# Altium footprint library Connectors.PcbLib: 120 footprints (part 3 of 8)
Each footprint in its own frame and in the unit in brackets; x right, y up, seen from the top. Pads: shape width x height; smd on the part's side, far side on the other; paste and mask are expansions set on the pad; w line width, h text height; cw(c..) or ccw(c..) is an arc to the next point about the centre after c.
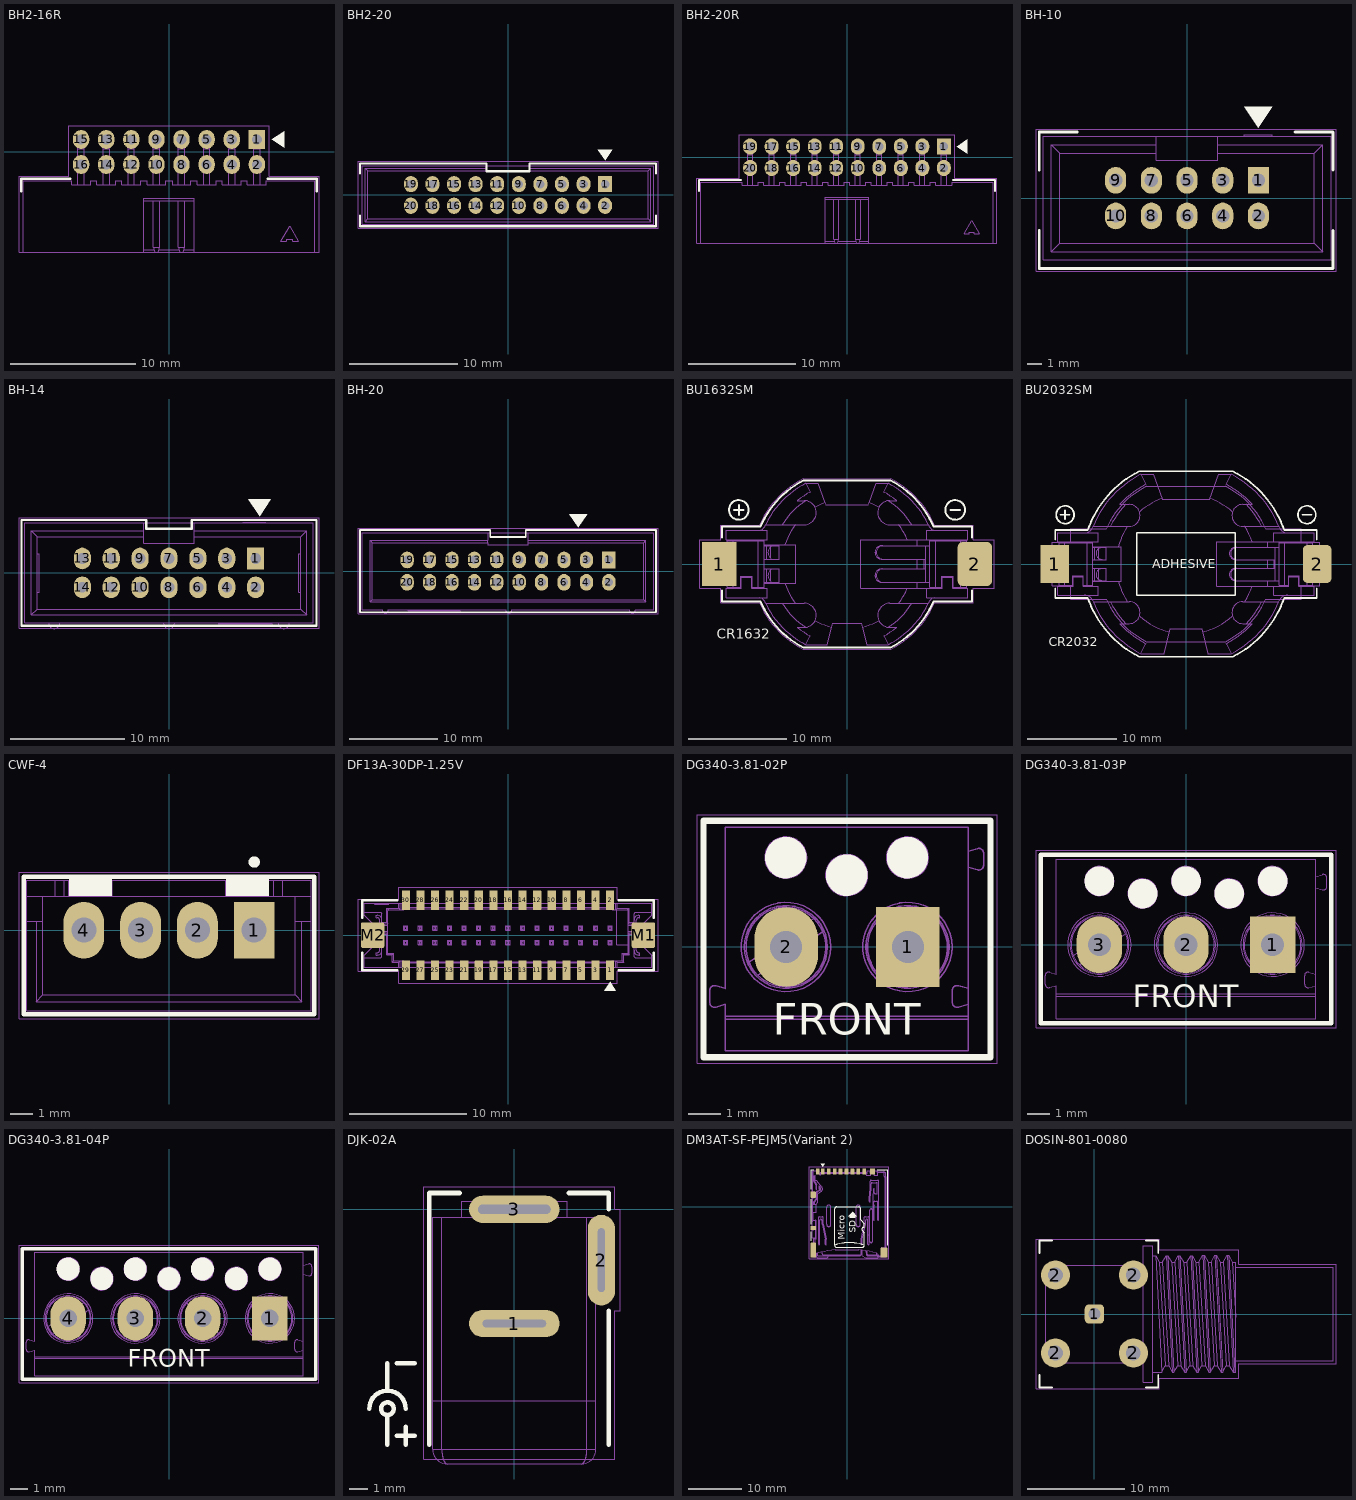
[diagram p2: the footprints below, top view; thin cyan lines are the x and y axes]

## BH2-16R [mm]
pads (16):
  rect 1.3x1.5 hole 0.8: 1(7,1)
  oval 1.3x1.5 hole 0.8: 2(7,-1) 3(5,1) 4(5,-1) 5(3,1) 6(3,-1) 7(1,1) 8(1,-1) 9(-1,1) 10(-1,-1) 11(-3,1) 12(-3,-1) 13(-5,1) 14(-5,-1) 15(-7,1) 16(-7,-1)
Top Overlay:
  region: 8.2,1 9.2,1.667 9.2,0.333
  lines w0.2: -11.775,-3.125 -11.775,-2.125 -7.875,-2.125 ; 7.875,-2.125 11.775,-2.125 11.775,-3.125
Top Courtyard:
  lines w0.025: -11.95,-8 -11.95,-1.95 -8,-1.95 -8,2.1 8,2.1 8,-1.95 11.95,-1.95 11.95,-8 -11.95,-8
Top Assembly:
  lines w0.05: -7.25,-2.6 -7.25,0.25 ; -6.75,-2.6 -6.75,0.25 ; -5.25,-2.6 -5.25,0.25 ; -4.75,-2.6 -4.75,0.25 ; -3.25,-2.6 -3.25,0.25 ; -2.75,-2.6 -2.75,0.25 ; -2,-7.8 -1.196,-7.8 ; -2,-3.9 2,-3.9 ; -1.25,-3.9 -1.25,-7.6 ; -1.25,-2.6 -1.25,0.25 ; -0.804,-7.8 0.804,-7.8 ; -0.75,-3.9 -0.75,-7.6 ; -0.75,-2.6 -0.75,0.25 ; 0.75,-3.9 0.75,-7.6 ; 0.75,-2.6 0.75,0.25 ; 1.196,-7.8 2,-7.8 ; 1.25,-3.9 1.25,-7.6 ; 1.25,-2.6 1.25,0.25 ; 2.75,-2.6 2.75,0.25 ; 3.25,-2.6 3.25,0.25 ; 4.75,-2.6 4.75,0.25 ; 5.25,-2.6 5.25,0.25 ; 6.75,-2.6 6.75,0.25 ; 7.25,-2.6 7.25,0.25 ; -7.25,0.25 -6.75,0.25 ; -7.25,0.25 -7.25,1.25 -6.75,1.25 -6.75,0.25 ; -5.25,0.25 -4.75,0.25 ; -5.25,0.25 -5.25,1.25 -4.75,1.25 -4.75,0.25 ; -3.25,0.25 -2.75,0.25 ; -3.25,0.25 -3.25,1.25 -2.75,1.25 -2.75,0.25 ; -2,-8 -2,-3.7 2,-3.7 2,-8 ; -2,-8 -11.6,-8 -11.6,-2.3 -7.75,-2.3 -7.75,-2.6 -6.25,-2.6 -6.25,-2.3 -5.75,-2.3 -5.75,-2.6 -4.25,-2.6 -4.25,-2.3 -3.75,-2.3 -3.75,-2.6 -2.25,-2.6 -2.25,-2.3 -1.75,-2.3 -1.75,-2.6 -0.25,-2.6 -0.25,-2.3 0.25,-2.3 0.25,-2.6 1.75,-2.6 1.75,-2.3 2.25,-2.3 2.25,-2.6 3.75,-2.6 3.75,-2.3 4.25,-2.3 4.25,-2.6 5.75,-2.6 5.75,-2.3 6.25,-2.3 6.25,-2.6 7.75,-2.6 7.75,-2.3 11.6,-2.3 11.6,-8 2,-8 ; -2,-8 -1.143,-8 ; -1.25,-7.6 -0.75,-7.6 ; -1.25,-7.6 -1.143,-8 ; -1.25,0.25 -0.75,0.25 ; -1.25,0.25 -1.25,1.25 -0.75,1.25 -0.75,0.25 ; -1.143,-8 -0.857,-8 ; -0.857,-8 0.857,-8 ; -0.857,-8 -0.75,-7.6 ; 0.75,-7.6 0.857,-8 ; 0.75,-7.6 1.25,-7.6 ; 0.75,0.25 1.25,0.25 ; 0.75,0.25 0.75,1.25 1.25,1.25 1.25,0.25 ; 0.857,-8 1.143,-8 ; 1.143,-8 2,-8 ; 1.143,-8 1.25,-7.6 ; 2.75,0.25 3.25,0.25 ; 2.75,0.25 2.75,1.25 3.25,1.25 3.25,0.25 ; 4.75,0.25 5.25,0.25 ; 4.75,0.25 4.75,1.25 5.25,1.25 5.25,0.25 ; 6.75,0.25 7.25,0.25 ; 6.75,0.25 6.75,1.25 7.25,1.25 7.25,0.25 ; 8.907,-7.1 9.6,-5.9 10.293,-7.1 9.85,-7.1 9.85,-6.95 9.35,-6.95 9.35,-7.1 8.907,-7.1
  text ".Designator" at -11.011,-5.453 h2
3D body "L-KLS1-202B-16-R-B.x_t": height 5.69, standoff -2.61, extent -11.6,-8 11.6,1.25

## BH2-20 [mm]
pads (20):
  rect 1.3x1.5 hole 0.8: 1(9,1)
  oval 1.3x1.5 hole 0.8: 2(9,-1) 3(7,1) 4(7,-1) 5(5,1) 6(5,-1) 7(3,1) 8(3,-1) 9(1,1) 10(1,-1) 11(-1,1) 12(-1,-1) 13(-3,1) 14(-3,-1) 15(-5,1) 16(-5,-1) 17(-7,1) 18(-7,-1) 19(-9,1) 20(-9,-1)
Top Overlay:
  region: 9,3.2 8.333,4.2 9.667,4.2
  lines w0.2: -13.7,-1.9 -13.7,-2.9 13.7,-2.9 13.7,-1.9 ; -13.7,2 -13.7,2.9 -2,2.9 -2,2.2 2,2.2 2,2.9 13.7,2.9 13.7,2
Top Courtyard:
  lines w0.025: -13.9,-3.1 -13.9,3.1 13.9,3.1 13.9,-3.1 -13.9,-3.1
Top Assembly:
  drawing of 264 lines, arcs and shapes, not listed
  text ".Designator" at -4.511,3.547 h2
3D body "DS1014-20SF1B.x_t": height 5.61, standoff -2.49, extent -13.55,-2.7 13.55,2.7

## BH2-20R [mm]
pads (20):
  rect 1.3x1.5 hole 0.8: 1(9,1)
  oval 1.3x1.5 hole 0.8: 2(9,-1) 3(7,1) 4(7,-1) 5(5,1) 6(5,-1) 7(3,1) 8(3,-1) 9(1,1) 10(1,-1) 11(-1,1) 12(-1,-1) 13(-3,1) 14(-3,-1) 15(-5,1) 16(-5,-1) 17(-7,1) 18(-7,-1) 19(-9,1) 20(-9,-1)
Top Overlay:
  region: 10.2,1 11.2,1.667 11.2,0.333
  lines w0.2: -13.775,-3.125 -13.775,-2.125 -9.875,-2.125 ; 9.875,-2.125 13.775,-2.125 13.775,-3.125
Top Courtyard:
  lines w0.025: -13.95,-8 -13.95,-1.95 -10,-1.95 -10,2.1 10,2.1 10,-1.95 13.95,-1.95 13.95,-8 -13.95,-8
Top Assembly:
  lines w0.05: -9.25,-2.6 -9.25,0.25 ; -8.75,-2.6 -8.75,0.25 ; -7.25,-2.6 -7.25,0.25 ; -6.75,-2.6 -6.75,0.25 ; -5.25,-2.6 -5.25,0.25 ; -4.75,-2.6 -4.75,0.25 ; -3.25,-2.6 -3.25,0.25 ; -2.75,-2.6 -2.75,0.25 ; -2,-7.8 -1.196,-7.8 ; -2,-3.9 2,-3.9 ; -1.25,-3.9 -1.25,-7.6 ; -1.25,-2.6 -1.25,0.25 ; -0.804,-7.8 0.804,-7.8 ; -0.75,-3.9 -0.75,-7.6 ; -0.75,-2.6 -0.75,0.25 ; 0.75,-3.9 0.75,-7.6 ; 0.75,-2.6 0.75,0.25 ; 1.196,-7.8 2,-7.8 ; 1.25,-3.9 1.25,-7.6 ; 1.25,-2.6 1.25,0.25 ; 2.75,-2.6 2.75,0.25 ; 3.25,-2.6 3.25,0.25 ; 4.75,-2.6 4.75,0.25 ; 5.25,-2.6 5.25,0.25 ; 6.75,-2.6 6.75,0.25 ; 7.25,-2.6 7.25,0.25 ; 8.75,-2.6 8.75,0.25 ; 9.25,-2.6 9.25,0.25 ; -9.25,0.25 -9.25,1.25 -8.75,1.25 -8.75,0.25 ; -9.25,0.25 -8.75,0.25 ; -7.25,0.25 -7.25,1.25 -6.75,1.25 -6.75,0.25 ; -7.25,0.25 -6.75,0.25 ; -5.25,0.25 -5.25,1.25 -4.75,1.25 -4.75,0.25 ; -5.25,0.25 -4.75,0.25 ; -3.25,0.25 -3.25,1.25 -2.75,1.25 -2.75,0.25 ; -3.25,0.25 -2.75,0.25 ; -2,-8 -1.143,-8 ; -2,-8 -13.6,-8 -13.6,-2.3 -9.75,-2.3 -9.75,-2.6 -8.25,-2.6 -8.25,-2.3 -7.75,-2.3 -7.75,-2.6 -6.25,-2.6 -6.25,-2.3 -5.75,-2.3 -5.75,-2.6 -4.25,-2.6 -4.25,-2.3 -3.75,-2.3 -3.75,-2.6 -2.25,-2.6 -2.25,-2.3 -1.75,-2.3 -1.75,-2.6 -0.25,-2.6 -0.25,-2.3 0.25,-2.3 0.25,-2.6 1.75,-2.6 1.75,-2.3 2.25,-2.3 2.25,-2.6 3.75,-2.6 3.75,-2.3 4.25,-2.3 4.25,-2.6 5.75,-2.6 5.75,-2.3 6.25,-2.3 6.25,-2.6 7.75,-2.6 7.75,-2.3 8.25,-2.3 8.25,-2.6 9.75,-2.6 9.75,-2.3 13.6,-2.3 13.6,-8 2,-8 ; -2,-8 -2,-3.7 2,-3.7 2,-8 ; -1.25,-7.6 -1.143,-8 ; -1.25,-7.6 -0.75,-7.6 ; -1.25,0.25 -1.25,1.25 -0.75,1.25 -0.75,0.25 ; -1.25,0.25 -0.75,0.25 ; -1.143,-8 -0.857,-8 ; -0.857,-8 -0.75,-7.6 ; -0.857,-8 0.857,-8 ; 0.75,-7.6 0.857,-8 ; 0.75,-7.6 1.25,-7.6 ; 0.75,0.25 0.75,1.25 1.25,1.25 1.25,0.25 ; 0.75,0.25 1.25,0.25 ; 0.857,-8 1.143,-8 ; 1.143,-8 1.25,-7.6 ; 1.143,-8 2,-8 ; 2.75,0.25 2.75,1.25 3.25,1.25 3.25,0.25 ; 2.75,0.25 3.25,0.25 ; 4.75,0.25 4.75,1.25 5.25,1.25 5.25,0.25 ; 4.75,0.25 5.25,0.25 ; 6.75,0.25 6.75,1.25 7.25,1.25 7.25,0.25 ; 6.75,0.25 7.25,0.25 ; 8.75,0.25 8.75,1.25 9.25,1.25 9.25,0.25 ; 8.75,0.25 9.25,0.25 ; 10.907,-7.1 11.35,-7.1 11.35,-6.95 11.85,-6.95 11.85,-7.1 12.293,-7.1 11.6,-5.9 10.907,-7.1
  text ".Designator" at -11.011,-5.453 h2
3D body "DS1014-20RF1B-B.x_t": height 5.69, standoff -2.61, extent -13.6,-8 13.6,1.25

## BH-10 [mm] "DS1013-10S CONNFLY"
pads (10):
  rect 1.5x1.9 hole 0.95: 1(5.08,1.27)
  oval 1.5x1.9 hole 0.95: 2(5.08,-1.27) 3(2.54,1.27) 4(2.54,-1.27) 5(0,1.27) 6(0,-1.27) 7(-2.54,1.27) 8(-2.54,-1.27) 9(-5.08,1.27) 10(-5.08,-1.27)
Top Overlay:
  region: 5.08,5 4.08,6.5 6.08,6.5
  lines w0.2: -10.52,-2.3 -10.52,-5 -0.92,-5 7.68,-5 10.38,-5 10.38,-2.3 ; -10.52,2 -10.52,4.7 -7.82,4.7 ; 7.68,4.7 10.38,4.7 10.38,2
Top Courtyard:
  lines w0.025: -10.75,-5.2 10.6,-5.2 10.6,4.9 -10.75,4.9 -10.75,-5.2
Top Assembly:
  lines w0.05: 4.08,4.4 4.08,4.5 6.08,4.5 6.08,4.4 ; -9.65,-3.8 -9.05,-3.2 ; -9.65,-3.8 9.65,-3.8 ; -9.65,-3.8 -9.65,3.8 ; -9.65,3.8 -9.05,3.2 ; -9.65,3.8 -2.2,3.8 ; -9.05,-3.2 9.05,-3.2 ; -9.05,-3.2 -9.05,3.2 ; -9.05,3.2 -2.2,3.2 ; -5.4,-1.59 -4.76,-1.59 ; -5.4,-1.59 -5.4,-0.95 ; -5.4,-1.59 -5.3,-1.49 ; -5.4,-0.95 -4.76,-0.95 ; -5.4,-0.95 -5.3,-1.05 ; -5.4,0.95 -4.76,0.95 ; -5.4,0.95 -5.4,1.59 ; -5.4,0.95 -5.3,1.05 ; -5.4,1.59 -4.76,1.59 ; -5.4,1.59 -5.3,1.49 ; -5.3,-1.49 -4.86,-1.49 ; -5.3,-1.49 -5.3,-1.05 ; -5.3,-1.05 -4.86,-1.05 ; -5.3,1.05 -4.86,1.05 ; -5.3,1.05 -5.3,1.49 ; -5.3,1.49 -4.86,1.49 ; -4.86,-1.49 -4.86,-1.05 ; -4.86,-1.49 -4.76,-1.59 ; -4.86,-1.05 -4.76,-0.95 ; -4.86,1.05 -4.86,1.49 ; -4.86,1.05 -4.76,0.95 ; -4.86,1.49 -4.76,1.59 ; -4.76,-1.59 -4.76,-0.95 ; -4.76,0.95 -4.76,1.59 ; -2.86,-1.59 -2.86,-0.95 ; -2.86,-1.59 -2.76,-1.49 ; -2.86,-1.59 -2.22,-1.59 ; -2.86,-0.95 -2.22,-0.95 ; -2.86,-0.95 -2.76,-1.05 ; -2.86,0.95 -2.22,0.95 ; -2.86,0.95 -2.86,1.59 ; -2.86,0.95 -2.76,1.05 ; -2.86,1.59 -2.22,1.59 ; -2.86,1.59 -2.76,1.49 ; -2.76,-1.49 -2.76,-1.05 ; -2.76,-1.49 -2.32,-1.49 ; -2.76,-1.05 -2.32,-1.05 ; -2.76,1.05 -2.32,1.05 ; -2.76,1.05 -2.76,1.49 ; -2.76,1.49 -2.32,1.49 ; -2.32,-1.49 -2.32,-1.05 ; -2.32,-1.49 -2.22,-1.59 ; -2.32,-1.05 -2.22,-0.95 ; -2.32,1.05 -2.32,1.49 ; -2.32,1.05 -2.22,0.95 ; -2.32,1.49 -2.22,1.59 ; -2.22,-1.59 -2.22,-0.95 ; -2.22,0.95 -2.22,1.59 ; -2.2,3.2 -2.2,2.7 2.2,2.7 2.2,3.2 ; -2.2,3.2 -2.2,3.8 ; -2.2,3.8 -2.2,4.4 ; -2.2,4.4 2.2,4.4 ; -2.2,4.4 -10.25,4.4 -10.25,-4.4 10.25,-4.4 10.25,4.4 2.2,4.4 ; -0.32,-1.59 0.32,-1.59 ; -0.32,-1.59 -0.32,-0.95 ; -0.32,-1.59 -0.22,-1.49 ; -0.32,-0.95 0.32,-0.95 ; -0.32,-0.95 -0.22,-1.05 ; -0.32,0.95 -0.32,1.59 ; -0.32,0.95 -0.22,1.05 ; -0.32,0.95 0.32,0.95 ; -0.32,1.59 0.32,1.59 ; -0.32,1.59 -0.22,1.49 ; -0.22,-1.49 0.22,-1.49 ; -0.22,-1.49 -0.22,-1.05 ; -0.22,-1.05 0.22,-1.05 ; -0.22,1.05 -0.22,1.49 ; -0.22,1.05 0.22,1.05 ; -0.22,1.49 0.22,1.49 ; 0.22,-1.49 0.22,-1.05 ; 0.22,-1.49 0.32,-1.59 ; 0.22,-1.05 0.32,-0.95 ; 0.22,1.05 0.22,1.49 ; 0.22,1.05 0.32,0.95 ; 0.22,1.49 0.32,1.59 ; 0.32,-1.59 0.32,-0.95 ; 0.32,0.95 0.32,1.59 ; 2.2,3.2 2.2,3.8 ; 2.2,3.2 9.05,3.2 ; 2.2,3.8 2.2,4.4 ; 2.2,3.8 9.65,3.8 ; 2.22,-1.59 2.22,-0.95 ; 2.22,-1.59 2.32,-1.49 ; 2.22,-1.59 2.86,-1.59 ; 2.22,-0.95 2.86,-0.95 ; 2.22,-0.95 2.32,-1.05 ; 2.22,0.95 2.86,0.95 ; 2.22,0.95 2.22,1.59 ; 2.22,0.95 2.32,1.05 ; 2.22,1.59 2.86,1.59 ; 2.22,1.59 2.32,1.49 ; 2.32,-1.49 2.32,-1.05 ; 2.32,-1.49 2.76,-1.49 ; 2.32,-1.05 2.76,-1.05 ; 2.32,1.05 2.76,1.05 ; 2.32,1.05 2.32,1.49 ; 2.32,1.49 2.76,1.49 ; 2.76,-1.49 2.76,-1.05 ; 2.76,-1.49 2.86,-1.59 ; 2.76,-1.05 2.86,-0.95 ; 2.76,1.05 2.76,1.49 ; 2.76,1.05 2.86,0.95 ; 2.76,1.49 2.86,1.59 ; 2.86,-1.59 2.86,-0.95 ; 2.86,0.95 2.86,1.59 ; 4.76,-1.59 4.76,-0.95 ; 4.76,-1.59 4.86,-1.49 ; 4.76,-1.59 5.4,-1.59 ; 4.76,-0.95 5.4,-0.95 ; 4.76,-0.95 4.86,-1.05 ; 4.76,0.95 4.76,1.59 ; 4.76,0.95 4.86,1.05 ; 4.76,0.95 5.4,0.95 ; 4.76,1.59 5.4,1.59 ; 4.76,1.59 4.86,1.49 ; 4.86,-1.49 4.86,-1.05 ; 4.86,-1.49 5.3,-1.49 ; 4.86,-1.05 5.3,-1.05 ; 4.86,1.05 4.86,1.49 ; 4.86,1.05 5.3,1.05 ; 4.86,1.49 5.3,1.49 ; 5.3,-1.49 5.3,-1.05 ; 5.3,-1.49 5.4,-1.59 ; 5.3,-1.05 5.4,-0.95 ; 5.3,1.05 5.3,1.49 ; 5.3,1.05 5.4,0.95 ; 5.3,1.49 5.4,1.59 ; 5.4,-1.59 5.4,-0.95 ; 5.4,0.95 5.4,1.59 ; 9.05,-3.2 9.05,3.2 ; 9.05,-3.2 9.65,-3.8 ; 9.05,3.2 9.65,3.8 ; 9.65,-3.8 9.65,3.8
  text ".Designator" at -4.511,5.047 h2
3D body "User Library-IDC-10M.STEP": height 9.3, standoff -3.1, extent -10.17,-4.7 10.13,4.4

## BH-14 [mm]
pads (14):
  rect 1.5x1.9 hole 0.95: 1(7.62,1.27)
  oval 1.5x1.9 hole 0.95: 2(7.62,-1.27) 3(5.08,1.27) 4(5.08,-1.27) 5(2.54,1.27) 6(2.54,-1.27) 7(0,1.27) 8(0,-1.27) 9(-2.54,1.27) 10(-2.54,-1.27) 11(-5.08,1.27) 12(-5.08,-1.27) 13(-7.62,1.27) 14(-7.62,-1.27)
Top Overlay:
  region: 7.961,4.965 6.961,6.465 8.961,6.465
  lines w0.2: -12.965,-4.65 -12.965,4.65 -2,4.65 -2,3.875 2,3.875 2,4.65 12.965,4.65 12.965,-4.65 -2,-4.65 -12.95,-4.65
Top Courtyard:
  lines w0.025: -13.19,-4.85 13.19,-4.85 13.19,4.85 -13.19,4.85 -13.19,-4.85
Top Assembly:
  drawing of 204 lines, arcs and shapes, not listed
  text ".Designator" at -4.511,5.047 h2
3D body "IDC-14_X_T.x_t": height 9.45, standoff -3.25, extent -12.7,-4.946 12.7,4.4

## BH-20 [mm]
pads (20):
  rect 1.5x1.9 hole 0.95: 1(11.43,1.27)
  oval 1.5x1.9 hole 0.95: 2(11.43,-1.27) 3(8.89,1.27) 4(8.89,-1.27) 5(6.35,1.27) 6(6.35,-1.27) 7(3.81,1.27) 8(3.81,-1.27) 9(1.27,1.27) 10(1.27,-1.27) 11(-1.27,1.27) 12(-1.27,-1.27) 13(-3.81,1.27) 14(-3.81,-1.27) 15(-6.35,1.27) 16(-6.35,-1.27) 17(-8.89,1.27) 18(-8.89,-1.27) 19(-11.43,1.27) 20(-11.43,-1.27)
Top Overlay:
  region: 7.961,4.965 6.961,6.465 8.961,6.465
  lines w0.2: -16.775,-4.65 -16.775,-1.95 -16.775,4.65 -2,4.65 -2,3.875 2,3.875 2,4.65 16.775,4.65 16.775,1.95 16.775,-4.65 -2,-4.65 -16.775,-4.65
Top Courtyard:
  lines w0.025: -17,-4.85 -17,4.85 17,4.85 17,-4.85 -17,-4.85
Top Assembly:
  drawing of 276 lines, arcs and shapes, not listed
  text ".Designator" at -4.511,5.047 h2
3D body "BH-20.step": height 9.05, standoff -2.8, extent -16.51,-4.725 16.51,4.375

## BU1632SM [mm] "CR1632 Holder"
pads (2):
  rect 3.5x4.5 smd paste-3 mask+0.08: 1(-13,0)
  rrect30% 3.5x4.5 smd paste-3 mask+0.08: 2(13,0)
Top Overlay:
  circle w0.2: c11,5.5 r1
  circle w0.2: c-11,5.5 r1
  lines w0.2: -12.7,-2.7 -12.7,-3.8 -8.8,-3.8 ccw(c0,0) -4.406,-8.513 4.406,-8.513 ccw(c0,0) 8.8,-3.8 12.7,-3.8 12.7,-2.7 ; -12.7,2.7 -12.7,3.8 -8.8,3.8 cw(c0,0) -4.406,8.513 4.406,8.513 cw(c0,0) 8.8,3.8 12.7,3.8 12.7,2.7 ; -11.5,5.5 -10.5,5.5 ; -11,5 -11,6 ; 10.5,5.5 11.5,5.5
  text "CR1632" at -13.249,-7.6 h1
Top Paste:
  rectangle: 13.7,-2.05 14.5,-1.25
  rectangle: 12.6,-2.05 13.4,-1.25
  rectangle: 11.5,-2.05 12.3,-1.25
  rectangle: 13.7,-0.95 14.5,-0.15
  rectangle: 12.6,-0.95 13.4,-0.15
  rectangle: 11.5,-0.95 12.3,-0.15
  rectangle: 13.7,0.15 14.5,0.95
  rectangle: 12.6,0.15 13.4,0.95
  rectangle: 11.5,0.15 12.3,0.95
  rectangle: 13.7,1.25 14.5,2.05
  rectangle: 12.6,1.25 13.4,2.05
  rectangle: 11.5,1.25 12.3,2.05
  rectangle: -12.3,-2.05 -11.5,-1.25
  rectangle: -13.4,-2.05 -12.6,-1.25
  rectangle: -14.5,-2.05 -13.7,-1.25
  rectangle: -12.3,-0.95 -11.5,-0.15
  rectangle: -13.4,-0.95 -12.6,-0.15
  rectangle: -14.5,-0.95 -13.7,-0.15
  rectangle: -12.3,0.15 -11.5,0.95
  rectangle: -13.4,0.15 -12.6,0.95
  rectangle: -14.5,0.15 -13.7,0.95
  rectangle: -12.3,1.25 -11.5,2.05
  rectangle: -13.4,1.25 -12.6,2.05
  rectangle: -14.5,1.25 -13.7,2.05
Top Courtyard:
  lines w0.025: -14.95,-2.45 -12.85,-2.45 -12.85,-3.95 -8.9,-3.95 ccw(c0,0) -4.452,-8.66 4.452,-8.66 ccw(c0,0) 8.9,-3.95 12.85,-3.95 12.85,-2.45 14.95,-2.45 14.95,2.45 12.85,2.45 12.85,3.95 8.9,3.95 ccw(c0,0) 4.452,8.66 -4.452,8.66 ccw(c0,0) -8.9,3.95 -12.85,3.95 -12.85,2.45 -14.95,2.45 -14.95,-2.45
Top Assembly:
  drawing of 210 lines, arcs and shapes, not listed
  text ".Designator" at -8.763,-0.679 h3
3D body "BU1632SM-JJ-GTR.STEP": height 5.47, standoff 0.17, extent -13.85,-8.2 13.85,8.2

## BU2032SM [mm] "CR0232 Holder"
pads (2):
  rect 3.2x4.2 smd paste-3 mask+0.08: 1(-14.65,0)
  rrect30% 3.2x4.2 smd paste-3 mask+0.08: 2(14.65,0)
Top Overlay:
  circle w0.2: c13.5,5.5 r1
  circle w0.2: c-13.5,5.5 r1
  lines w0.2: -14.6,-2.7 -14.6,-3.8 -10.964,-3.8 ; -14.6,2.7 -14.6,3.8 -10.964,3.8 ; -14,5.5 -13,5.5 ; -13.5,5 -13.5,6 ; -10.96,-3.799 ccw(c0,0) -5.224,-10.357 5.224,-10.357 ccw(c0,0) 10.96,-3.799 ; -10.96,3.799 cw(c0,0) -5.224,10.357 5.224,10.357 cw(c0,0) 10.96,3.799 ; 10.964,-3.8 14.6,-3.8 14.6,-2.7 ; 10.964,3.8 14.6,3.8 14.6,2.7 ; 13,5.5 14,5.5 ; -5.5,-3.5 -5.5,3.5 5.5,3.5 5.5,-3.5 -5.5,-3.5
  text "ADHESIVE" at -3.749,-0.5 h1
  text "CR2032" at -15.332,-9.2 h1
Top Paste:
  region: 13.95,-1.25 13.15,-1.25 13.15,-2.05 13.95,-2.05
  region: 15.05,-1.25 14.25,-1.25 14.25,-2.05 15.05,-2.05
  region: 16.15,-1.25 15.35,-1.25 15.35,-2.05 16.15,-2.05
  region: 13.95,-0.15 13.15,-0.15 13.15,-0.95 13.95,-0.95
  region: 15.05,-0.15 14.25,-0.15 14.25,-0.95 15.05,-0.95
  region: 16.15,-0.15 15.35,-0.15 15.35,-0.95 16.15,-0.95
  region: 13.95,0.95 13.15,0.95 13.15,0.15 13.95,0.15
  region: 15.05,0.95 14.25,0.95 14.25,0.15 15.05,0.15
  region: 16.15,0.95 15.35,0.95 15.35,0.15 16.15,0.15
  region: 13.95,2.05 13.15,2.05 13.15,1.25 13.95,1.25
  region: 15.05,2.05 14.25,2.05 14.25,1.25 15.05,1.25
  region: 16.15,2.05 15.35,2.05 15.35,1.25 16.15,1.25
  rectangle: -13.95,-2.05 -13.15,-1.25
  rectangle: -15.05,-2.05 -14.25,-1.25
  rectangle: -16.15,-2.05 -15.35,-1.25
  rectangle: -13.95,-0.95 -13.15,-0.15
  rectangle: -15.05,-0.95 -14.25,-0.15
  rectangle: -16.15,-0.95 -15.35,-0.15
  rectangle: -13.95,0.15 -13.15,0.95
  rectangle: -15.05,0.15 -14.25,0.95
  rectangle: -16.15,0.15 -15.35,0.95
  rectangle: -13.95,1.25 -13.15,2.05
  rectangle: -15.05,1.25 -14.25,2.05
  rectangle: -16.15,1.25 -15.35,2.05
Top Courtyard:
  lines w0.025: -14.95,-2.45 -12.85,-2.45 -12.85,-3.95 -8.9,-3.95 ccw(c0,0) -4.452,-8.66 4.452,-8.66 ccw(c0,0) 8.9,-3.95 12.85,-3.95 12.85,-2.45 14.95,-2.45 14.95,2.45 12.85,2.45 12.85,3.95 8.9,3.95 ccw(c0,0) 4.452,8.66 -4.452,8.66 ccw(c0,0) -8.9,3.95 -12.85,3.95 -12.85,2.45 -14.95,2.45 -14.95,-2.45
Top Assembly:
  drawing of 213 lines, arcs and shapes, not listed
  text ".Designator" at -8.763,-0.679 h3
3D body "BU2032SM-JJ-GTR.x_t": height 5.47, standoff 0.17, extent -15.85,-10 15.85,10

## CWF-4 [mm]
height 0.6
pads (4):
  rect 1.8x2.5 hole 1.1: 1(3.75,0)
  oval 1.8x2.5 hole 1.1: 2(1.25,0) 3(-1.25,0) 4(-3.75,0)
Top Overlay:
  circle w0.25: c3.75,3 r0.125
  rectangle: -4.4,1.5 -2.5,2.35
  region: 4.4,2.35 2.5,2.35 2.5,1.5 4.4,1.5
  lines w0.2: -6.4,-3.7 -6.4,2.35 6.4,2.35 6.4,-3.7 -6.4,-3.7
Top Courtyard:
  lines w0.025: -6.6,-3.9 6.6,-3.9 6.6,2.55 -6.6,2.55 -6.6,-3.9
Top Assembly:
  lines w0.05: -5.55,1.5 -5.55,0.4 ; 5.55,1.5 5.55,0.4 ; -6.25,0.4 -5.85,0.4 ; -6.25,0.4 -6.25,1.5 ; -6.25,0.4 -6.25,-3.55 6.25,-3.55 6.25,0.4 ; -6.25,1.5 -6.25,2.2 -5,2.2 ; -6.25,1.5 -5,1.5 ; -5.85,-3.15 5.85,-3.15 ; -5.85,-3.15 -5.85,0.4 ; -5.85,-3.15 -5.55,-2.85 ; -5.85,0.4 -5.55,0.4 ; -5.55,-2.85 5.55,-2.85 ; -5.55,-2.85 -5.55,0.4 ; -5,1.5 -4.6,1.5 ; -5,1.5 -5,2.2 ; -5,2.2 -4.6,2.2 ; -4.6,1.5 -4.4,1.5 ; -4.6,1.5 -4.6,2.2 ; -4.6,2.2 -4.4,2.2 ; -4.4,1.5 -4.4,2.2 ; -4.4,1.5 -2.5,1.5 ; -4.4,2.2 -2.5,2.2 ; -4.07,-0.32 -3.97,-0.22 ; -4.07,-0.32 -4.07,0.32 ; -4.07,-0.32 -3.43,-0.32 ; -4.07,0.32 -3.97,0.22 ; -4.07,0.32 -3.43,0.32 ; -3.97,-0.22 -3.97,0.22 ; -3.97,-0.22 -3.53,-0.22 ; -3.97,0.22 -3.53,0.22 ; -3.53,-0.22 -3.43,-0.32 ; -3.53,-0.22 -3.53,0.22 ; -3.53,0.22 -3.43,0.32 ; -3.43,-0.32 -3.43,0.32 ; -2.5,1.5 2.5,1.5 ; -2.5,1.5 -2.5,2.2 ; -2.5,2.2 2.5,2.2 ; -1.57,-0.32 -0.93,-0.32 ; -1.57,-0.32 -1.47,-0.22 ; -1.57,-0.32 -1.57,0.32 ; -1.57,0.32 -1.47,0.22 ; -1.57,0.32 -0.93,0.32 ; -1.47,-0.22 -1.03,-0.22 ; -1.47,-0.22 -1.47,0.22 ; -1.47,0.22 -1.03,0.22 ; -1.03,-0.22 -0.93,-0.32 ; -1.03,-0.22 -1.03,0.22 ; -1.03,0.22 -0.93,0.32 ; -0.93,-0.32 -0.93,0.32 ; 0.93,-0.32 1.57,-0.32 ; 0.93,-0.32 1.03,-0.22 ; 0.93,-0.32 0.93,0.32 ; 0.93,0.32 1.03,0.22 ; 0.93,0.32 1.57,0.32 ; 1.03,-0.22 1.47,-0.22 ; 1.03,-0.22 1.03,0.22 ; 1.03,0.22 1.47,0.22 ; 1.47,-0.22 1.57,-0.32 ; 1.47,-0.22 1.47,0.22 ; 1.47,0.22 1.57,0.32 ; 1.57,-0.32 1.57,0.32 ; 2.5,1.5 2.5,2.2 ; 2.5,1.5 4.4,1.5 ; 2.5,2.2 4.4,2.2 ; 3.43,-0.32 3.53,-0.22 ; 3.43,-0.32 3.43,0.32 ; 3.43,-0.32 4.07,-0.32 ; 3.43,0.32 3.53,0.22 ; 3.43,0.32 4.07,0.32 ; 3.53,-0.22 3.53,0.22 ; 3.53,-0.22 3.97,-0.22 ; 3.53,0.22 3.97,0.22 ; 3.97,-0.22 4.07,-0.32 ; 3.97,-0.22 3.97,0.22 ; 3.97,0.22 4.07,0.32 ; 4.07,-0.32 4.07,0.32 ; 4.4,1.5 4.6,1.5 ; 4.4,1.5 4.4,2.2 ; 4.4,2.2 4.6,2.2 ; 4.6,1.5 5,1.5 ; 4.6,1.5 4.6,2.2 ; 4.6,2.2 5,2.2 ; 5,1.5 5,2.2 ; 5,1.5 6.25,1.5 ; 5,2.2 6.25,2.2 6.25,1.5 ; 5.55,-2.85 5.55,0.4 ; 5.55,-2.85 5.85,-3.15 ; 5.55,0.4 5.85,0.4 ; 5.85,-3.15 5.85,0.4 ; 5.85,0.4 6.25,0.4 ; 6.25,0.4 6.25,1.5
  text ".Designator" at -4.511,-2.453 h2
3D body "CWF-4.x_t": height 7, standoff -3.5, extent -6.25,-3.55 6.25,2.2

## DF13A-30DP-1.25V [mm] "Double Row Straight Pin Header (SMT)"
height 0.6
pads (32):
  rrect15% 0.7x1.7 smd mask+0.05: 1(8.75,-3) 2(8.75,3) 3(7.5,-3) 4(7.5,3) 5(6.25,-3) 6(6.25,3) 7(5,-3) 8(5,3) 9(3.75,-3) 10(3.75,3) 11(2.5,-3) 12(2.5,3) 13(1.25,-3) 14(1.25,3) 15(0,-3) 16(0,3) 17(-1.25,-3) 18(-1.25,3) 19(-2.5,-3) 20(-2.5,3) 21(-3.75,-3) 22(-3.75,3) 23(-5,-3) 24(-5,3) 25(-6.25,-3) 26(-6.25,3) 27(-7.5,-3) 28(-7.5,3) 29(-8.75,-3) 30(-8.75,3)
  rrect15% 2x2.2 smd mask+0.05: M1(11.6,0) M2(-11.6,0)
Top Overlay:
  region: 8.75,-4 9.25,-4.75 8.25,-4.75
  lines w0.2: -12.5,-1.5 -12.5,-3 -9.5,-3 ; -12.5,1.5 -12.5,3 -9.5,3 ; 9.5,-3 12.5,-3 12.5,-1.5 ; 9.5,3 12.5,3 12.5,1.5
Top Courtyard:
  lines w0.025: -12.85,-3.1 -9.35,-3.1 -9.35,-4.1 9.35,-4.1 9.35,-3.1 12.85,-3.1 12.85,3.1 9.35,3.1 9.35,4.1 -9.35,4.1 -9.35,3.1 -12.85,3.1 -12.85,-3.1
Top Assembly:
  drawing of 984 lines, arcs and shapes, not listed
  text ".Designator" at -4.511,4.547 h2
3D body "DF13EA-30DP-1.25V.STEP": height 4.8, standoff 0, extent -12.3,-3.45 12.3,3.45

## DG340-3.81-02P [mm] "2-way screw terminal, pitch 150mils (3.81mm)"
height 8.4
pads (2):
  rect 2x2.5 hole 1: 1(1.905,0)
  oval 2x2.5 hole 1: 2(-1.905,0)
Top Overlay:
  circle w0.7: c-0.01,2.25 r0.3
  circle w0.7: c1.895,2.8 r0.3
  circle w0.7: c-1.915,2.8 r0.3
  lines w0.2: -4.495,-3.45 4.495,-3.45 4.495,3.95 -4.495,3.95 -4.495,-3.45
  text "FRONT" at -2.333,-2.75 h1
Top Courtyard:
  lines w0.025: -4.7,-3.65 4.7,-3.65 4.7,4.15 -4.7,4.15 -4.7,-3.65
Top Assembly:
  circle w0.05: c-1.915,0 r1.4
  circle w0.05: c1.895,0 r1.4
  circle w0.05: c-1.915,0 r1.3
  circle w0.05: c-1.915,2.8 r0.65
  circle w0.05: c1.895,2.8 r0.65
  circle w0.05: c-0.01,2.25 r0.65
  circle w0.05: c1.895,0 r1.3
  lines w0.05: -3.82,-2.263 3.8,-2.263 ; -3.82,-2.167 3.8,-2.167 ; -2.347,2.342 -1.483,2.342 ; 1.463,2.342 2.327,2.342 ; 3.8,-1.8 3.489,-1.885 cw(c3.45,-1.74) 3.3,-1.74 3.3,-1.36 cw(c3.45,-1.36) 3.489,-1.215 3.8,-1.3 ; 3.8,2.5 4.088,2.416 ccw(c4.13,2.56) 4.28,2.56 4.28,2.94 ccw(c4.13,2.94) 4.088,3.084 3.8,3 ; -3.07,-0.478 cw(c-1.915,0) -1.039,0.892 ; -3.07,-0.478 ccw(c-1.915,0) -2.791,-0.892 ; -3.07,-0.478 -2.815,-0.305 ; -2.815,-0.305 cw(c-1.915,0) -1.295,0.72 ; -2.815,-0.305 -1.295,0.72 ; -2.791,-0.892 ccw(c-1.915,0) -0.76,0.478 ; -2.791,-0.892 -2.535,-0.72 ; -2.535,-0.72 ccw(c-1.915,0) -1.015,0.305 ; -2.535,-0.72 -1.015,0.305 ; -1.295,0.72 -1.039,0.892 ; -1.039,0.892 cw(c-1.915,0) -0.76,0.478 ; -1.015,0.305 -0.76,0.478 ; 1.416,-1.155 cw(c1.895,0) 1.883,1.25 ; 1.416,-1.155 ccw(c1.895,0) 1.907,-1.25 ; 1.416,-1.155 1.475,-0.852 ; 1.475,-0.852 cw(c1.895,0) 1.824,0.947 ; 1.475,-0.852 1.824,0.947 ; 1.824,0.947 1.883,1.25 ; 1.883,1.25 cw(c1.895,0) 2.374,1.155 ; 1.907,-1.25 ccw(c1.895,0) 2.374,1.155 ; 1.907,-1.25 1.966,-0.947 ; 1.966,-0.947 ccw(c1.895,0) 2.315,0.852 ; 1.966,-0.947 2.315,0.852 ; 2.315,0.852 2.374,1.155 ; -4.3,-1.74 ccw(c-4.15,-1.74) -4.108,-1.884 -3.82,-1.8 -3.82,-3.25 3.8,-3.25 3.8,3.75 -3.82,3.75 -3.82,-1.3 -4.108,-1.216 ccw(c-4.15,-1.36) -4.3,-1.36 -4.3,-1.74 ; -2.493,3.05 ccw(c-1.915,2.8) -1.337,3.05 -1.359,3.05 ccw(c-1.915,2.8) -2.471,3.05 -2.493,3.05 ; -0.465,1.814 cw(c-0.01,2.25) -0.465,2.686 -0.465,2.665 -0.465,2.656 cw(c-0.01,2.25) 0.445,2.656 0.445,2.676 0.445,2.686 cw(c-0.01,2.25) 0.445,1.814 0.445,1.835 0.445,1.844 cw(c-0.01,2.25) -0.465,1.844 -0.465,1.824 -0.465,1.814 ; 1.317,3.05 ccw(c1.895,2.8) 2.473,3.05 2.451,3.05 ccw(c1.895,2.8) 1.339,3.05 1.317,3.05
  text ".Designator" at -4.511,4.297 h2
3D body "User Library-DG340-3_81-02P-1Y-00A (H).x_t": height 8.4, standoff -3.6, extent -4.29,-3.25 4.29,3.75

## DG340-3.81-03P [mm] "3-way screw terminal, pitch 150mils (3.81mm)"
height 8.4
pads (3):
  rect 2x2.5 hole 1: 1(3.81,0)
  oval 2x2.5 hole 1: 2(0,0) 3(-3.81,0)
Top Overlay:
  circle w0.7: c-3.81,2.8 r0.3
  circle w0.7: c-1.905,2.25 r0.3
  circle w0.7: c0,2.8 r0.3
  circle w0.7: c1.905,2.25 r0.3
  circle w0.7: c3.81,2.8 r0.3
  lines w0.2: -6.4,-3.45 6.4,-3.45 6.4,3.95 -6.4,3.95 -6.4,-3.45
  text "FRONT" at -2.333,-2.75 h1
Top Courtyard:
  lines w0.025: -6.6,-3.65 6.6,-3.65 6.6,4.15 -6.6,4.15 -6.6,-3.65
Top Assembly:
  circle w0.05: c-3.81,0 r1.4
  circle w0.05: c-3.81,2.8 r0.65
  circle w0.05: c0,0 r1.4
  circle w0.05: c0,2.8 r0.65
  circle w0.05: c3.81,0 r1.4
  circle w0.05: c3.81,2.8 r0.65
  circle w0.05: c-1.905,2.25 r0.65
  circle w0.05: c1.905,2.25 r0.65
  circle w0.05: c3.81,0 r1.3
  circle w0.05: c-3.81,0 r1.3
  circle w0.05: c0,0 r1.3
  lines w0.05: -5.715,-2.263 5.715,-2.263 ; -5.715,-2.167 5.715,-2.167 ; -4.242,2.342 -3.378,2.342 ; -0.432,2.342 0.432,2.342 ; 3.378,2.342 4.242,2.342 ; 5.715,-1.8 5.404,-1.885 cw(c5.365,-1.74) 5.215,-1.74 5.215,-1.36 cw(c5.365,-1.36) 5.404,-1.215 5.715,-1.3 ; 5.715,2.5 6.003,2.416 ccw(c6.045,2.56) 6.195,2.56 6.195,2.94 ccw(c6.045,2.94) 6.003,3.084 5.715,3 ; -4.965,-0.478 cw(c-3.81,0) -2.934,0.892 ; -4.965,-0.478 ccw(c-3.81,0) -4.686,-0.892 ; -4.965,-0.478 -4.71,-0.305 ; -4.71,-0.305 cw(c-3.81,0) -3.19,0.72 ; -4.71,-0.305 -3.19,0.72 ; -4.686,-0.892 ccw(c-3.81,0) -2.655,0.478 ; -4.686,-0.892 -4.43,-0.72 ; -4.43,-0.72 ccw(c-3.81,0) -2.91,0.305 ; -4.43,-0.72 -2.91,0.305 ; -3.19,0.72 -2.934,0.892 ; -2.934,0.892 cw(c-3.81,0) -2.655,0.478 ; -2.91,0.305 -2.655,0.478 ; -0.479,-1.155 cw(c0,0) -0.012,1.25 ; -0.479,-1.155 ccw(c0,0) 0.012,-1.25 ; -0.479,-1.155 -0.42,-0.852 ; -0.42,-0.852 cw(c0,0) -0.071,0.947 ; -0.42,-0.852 -0.071,0.947 ; -0.071,0.947 -0.012,1.25 ; -0.012,1.25 cw(c0,0) 0.479,1.155 ; 0.012,-1.25 ccw(c0,0) 0.479,1.155 ; 0.012,-1.25 0.071,-0.947 ; 0.071,-0.947 ccw(c0,0) 0.42,0.852 ; 0.071,-0.947 0.42,0.852 ; 0.42,0.852 0.479,1.155 ; 2.918,0.876 ccw(c3.81,0) 4.288,-1.155 ; 2.918,0.876 cw(c3.81,0) 3.332,1.155 ; 2.918,0.876 3.09,0.62 ; 3.09,0.62 ccw(c3.81,0) 4.115,-0.9 ; 3.09,0.62 4.115,-0.9 ; 3.332,1.155 cw(c3.81,0) 4.702,-0.876 ; 3.332,1.155 3.505,0.9 ; 3.505,0.9 cw(c3.81,0) 4.53,-0.62 ; 3.505,0.9 4.53,-0.62 ; 4.115,-0.9 4.288,-1.155 ; 4.288,-1.155 ccw(c3.81,0) 4.702,-0.876 ; 4.53,-0.62 4.702,-0.876 ; -6.195,-1.74 ccw(c-6.045,-1.74) -6.003,-1.884 -5.715,-1.8 -5.715,-3.25 5.715,-3.25 5.715,3.75 -5.715,3.75 -5.715,-1.3 -6.003,-1.216 ccw(c-6.045,-1.36) -6.195,-1.36 -6.195,-1.74 ; -4.388,3.05 ccw(c-3.81,2.8) -3.232,3.05 -3.254,3.05 ccw(c-3.81,2.8) -4.366,3.05 -4.388,3.05 ; -2.36,1.814 cw(c-1.905,2.25) -2.36,2.686 -2.36,2.665 -2.36,2.656 cw(c-1.905,2.25) -1.45,2.656 -1.45,2.676 -1.45,2.686 cw(c-1.905,2.25) -1.45,1.814 -1.45,1.835 -1.45,1.844 cw(c-1.905,2.25) -2.36,1.844 -2.36,1.824 -2.36,1.814 ; -0.578,3.05 ccw(c0,2.8) 0.578,3.05 0.556,3.05 ccw(c0,2.8) -0.556,3.05 -0.578,3.05 ; 1.45,1.814 cw(c1.905,2.25) 1.45,2.686 1.45,2.665 1.45,2.656 cw(c1.905,2.25) 2.36,2.656 2.36,2.676 2.36,2.686 cw(c1.905,2.25) 2.36,1.814 2.36,1.835 2.36,1.844 cw(c1.905,2.25) 1.45,1.844 1.45,1.824 1.45,1.814 ; 3.232,3.05 ccw(c3.81,2.8) 4.388,3.05 4.366,3.05 ccw(c3.81,2.8) 3.254,3.05 3.232,3.05
  text ".Designator" at -4.511,4.297 h2
3D body "DG340-3_81-03P-1Y-00A (H).x_t": height 8.4, standoff -3.6, extent -6.195,-3.25 6.195,3.75

## DG340-3.81-04P [mm] "4-way screw terminal, pitch 150mils (3.81mm)"
height 8.4
pads (4):
  rect 2x2.5 hole 1: 1(5.715,0)
  oval 2x2.5 hole 1: 2(1.905,0) 3(-1.905,0) 4(-5.715,0)
Top Overlay:
  circle w0.7: c5.715,2.8 r0.3
  circle w0.7: c3.81,2.25 r0.3
  circle w0.7: c-5.715,2.8 r0.3
  circle w0.7: c-3.81,2.25 r0.3
  circle w0.7: c-1.915,2.8 r0.3
  circle w0.7: c1.895,2.8 r0.3
  circle w0.7: c-0.01,2.25 r0.3
  lines w0.2: -8.305,-3.45 -8.305,3.95 8.305,3.95 8.305,-3.45 -8.305,-3.45
  text "FRONT" at -2.333,-2.75 h1
Top Courtyard:
  lines w0.025: -8.5,-3.65 8.5,-3.65 8.5,4.15 -8.5,4.15 -8.5,-3.65
Top Assembly:
  circle w0.05: c5.715,0 r1.4
  circle w0.05: c5.715,0 r1.3
  circle w0.05: c-5.715,0 r1.4
  circle w0.05: c-1.905,0 r1.4
  circle w0.05: c1.905,0 r1.4
  circle w0.05: c1.905,0 r1.3
  circle w0.05: c-5.715,0 r1.3
  circle w0.05: c-1.905,0 r1.3
  circle w0.05: c3.81,2.25 r0.65
  circle w0.05: c0,2.25 r0.65
  circle w0.05: c-3.81,2.25 r0.65
  circle w0.05: c5.715,2.8 r0.65
  circle w0.05: c1.905,2.8 r0.65
  circle w0.05: c-1.905,2.8 r0.65
  circle w0.05: c-5.715,2.8 r0.65
  lines w0.05: -7.62,-2.263 7.62,-2.263 ; -7.62,-2.167 7.62,-2.167 ; -6.147,2.342 -5.283,2.342 ; -2.337,2.342 -1.473,2.342 ; 1.473,2.342 2.337,2.342 ; 5.283,2.342 6.147,2.342 ; 7.62,-1.8 7.309,-1.885 cw(c7.27,-1.74) 7.12,-1.74 7.12,-1.36 cw(c7.27,-1.36) 7.309,-1.215 7.62,-1.3 ; 7.62,2.5 7.908,2.416 ccw(c7.95,2.56) 8.1,2.56 8.1,2.94 ccw(c7.95,2.94) 7.908,3.084 7.62,3 ; -6.87,-0.478 cw(c-5.715,0) -4.839,0.892 ; -6.87,-0.478 ccw(c-5.715,0) -6.591,-0.892 ; -6.87,-0.478 -6.615,-0.305 ; -6.615,-0.305 cw(c-5.715,0) -5.095,0.72 ; -6.615,-0.305 -5.095,0.72 ; -6.591,-0.892 ccw(c-5.715,0) -4.56,0.478 ; -6.591,-0.892 -6.335,-0.72 ; -6.335,-0.72 ccw(c-5.715,0) -4.815,0.305 ; -6.335,-0.72 -4.815,0.305 ; -5.095,0.72 -4.839,0.892 ; -4.839,0.892 cw(c-5.715,0) -4.56,0.478 ; -4.815,0.305 -4.56,0.478 ; -2.384,-1.155 cw(c-1.905,0) -1.917,1.25 ; -2.384,-1.155 ccw(c-1.905,0) -1.893,-1.25 ; -2.384,-1.155 -2.325,-0.852 ; -2.325,-0.852 cw(c-1.905,0) -1.976,0.947 ; -2.325,-0.852 -1.976,0.947 ; -1.976,0.947 -1.917,1.25 ; -1.917,1.25 cw(c-1.905,0) -1.426,1.155 ; -1.893,-1.25 ccw(c-1.905,0) -1.426,1.155 ; -1.893,-1.25 -1.834,-0.947 ; -1.834,-0.947 ccw(c-1.905,0) -1.485,0.852 ; -1.834,-0.947 -1.485,0.852 ; -1.485,0.852 -1.426,1.155 ; 1.013,0.876 ccw(c1.905,0) 2.383,-1.155 ; 1.013,0.876 cw(c1.905,0) 1.427,1.155 ; 1.013,0.876 1.185,0.62 ; 1.185,0.62 ccw(c1.905,0) 2.21,-0.9 ; 1.185,0.62 2.21,-0.9 ; 1.427,1.155 cw(c1.905,0) 2.797,-0.876 ; 1.427,1.155 1.6,0.9 ; 1.6,0.9 cw(c1.905,0) 2.625,-0.62 ; 1.6,0.9 2.625,-0.62 ; 2.21,-0.9 2.383,-1.155 ; 2.383,-1.155 ccw(c1.905,0) 2.797,-0.876 ; 2.625,-0.62 2.797,-0.876 ; 4.823,0.876 ccw(c5.715,0) 6.193,-1.155 ; 4.823,0.876 cw(c5.715,0) 5.237,1.155 ; 4.823,0.876 4.995,0.62 ; 4.995,0.62 ccw(c5.715,0) 6.02,-0.9 ; 4.995,0.62 6.02,-0.9 ; 5.237,1.155 cw(c5.715,0) 6.607,-0.876 ; 5.237,1.155 5.41,0.9 ; 5.41,0.9 cw(c5.715,0) 6.435,-0.62 ; 5.41,0.9 6.435,-0.62 ; 6.02,-0.9 6.193,-1.155 ; 6.193,-1.155 ccw(c5.715,0) 6.607,-0.876 ; 6.435,-0.62 6.607,-0.876 ; -8.1,-1.74 ccw(c-7.95,-1.74) -7.908,-1.884 -7.62,-1.8 -7.62,-3.25 7.62,-3.25 7.62,3.75 -7.62,3.75 -7.62,-1.3 -7.908,-1.216 ccw(c-7.95,-1.36) -8.1,-1.36 -8.1,-1.74 ; -6.293,3.05 ccw(c-5.715,2.8) -5.137,3.05 -5.159,3.05 ccw(c-5.715,2.8) -6.271,3.05 -6.293,3.05 ; -4.265,1.814 cw(c-3.81,2.25) -4.265,2.686 -4.265,2.665 -4.265,2.656 cw(c-3.81,2.25) -3.355,2.656 -3.355,2.676 -3.355,2.686 cw(c-3.81,2.25) -3.355,1.814 -3.355,1.835 -3.355,1.844 cw(c-3.81,2.25) -4.265,1.844 -4.265,1.824 -4.265,1.814 ; -2.483,3.05 ccw(c-1.905,2.8) -1.327,3.05 -1.349,3.05 ccw(c-1.905,2.8) -2.461,3.05 -2.483,3.05 ; -0.455,1.814 cw(c0,2.25) -0.455,2.686 -0.455,2.665 -0.455,2.656 cw(c0,2.25) 0.455,2.656 0.455,2.676 0.455,2.686 cw(c0,2.25) 0.455,1.814 0.455,1.835 0.455,1.844 cw(c0,2.25) -0.455,1.844 -0.455,1.824 -0.455,1.814 ; 1.327,3.05 ccw(c1.905,2.8) 2.483,3.05 2.461,3.05 ccw(c1.905,2.8) 1.349,3.05 1.327,3.05 ; 3.355,1.814 cw(c3.81,2.25) 3.355,2.686 3.355,2.665 3.355,2.656 cw(c3.81,2.25) 4.265,2.656 4.265,2.676 4.265,2.686 cw(c3.81,2.25) 4.265,1.814 4.265,1.835 4.265,1.844 cw(c3.81,2.25) 3.355,1.844 3.355,1.824 3.355,1.814 ; 5.137,3.05 ccw(c5.715,2.8) 6.293,3.05 6.271,3.05 ccw(c5.715,2.8) 5.159,3.05 5.137,3.05
  text ".Designator" at -4.511,4.297 h2
3D body "DG340-3_81-04P-1Y-00A (H).x_t": height 8.4, standoff -3.6, extent -8.1,-3.25 8.1,3.75

## DJK-02A [mm]
pads (3):
  oval 5x1.5 hole 0.4 slot 3.5 at 0 deg: 1(0,-6.3)
  oval 1.5x5 hole 0.4 slot 3.5 at 90 deg: 2(4.8,-2.8)
  oval 5x1.5 hole 0.5 slot 4 at 0 deg: 3(0,0)
Top Overlay:
  circle w0.25: c-7,-11 r0.35
  lines w0.25: -8,-11 cw(c-7,-11) -6,-11 ; -7,-13 -7,-11.4 ; -7,-10 -7,-8.5 ; -6.5,-12.5 -5.5,-12.5 ; -6.5,-8.5 -5.5,-8.5 ; -6,-13 -6,-12 ; -4.7,-13 -4.7,0.9 -3,0.9 ; 3,0.9 5.2,0.9 5.2,0 ; 5.2,-13 5.2,-5.6
Top Courtyard:
  lines w0.025: -5,-13.8 -5,1.25 5.55,1.25 5.55,0 5.85,0 5.85,-5.6 5.55,-5.6 5.55,-13.8 -5,-13.8
Top Assembly:
  drawing of 238 lines, arcs and shapes, not listed
  text ".Designator" at 0.685,-11.757 h3
3D body "User Library-DJK-02A-1.step": height 11, standoff -3.5, extent -4.5,-13.8 4.95,0.7

## DM3AT-SF-PEJM5(Variant 2) [mm] "SD Card Socket"
pads (14):
  rrect30% 0.7x1.2 smd paste+0 mask+0.05: 1(3.2,6.6) 2(2.1,6.6) 3(1,6.6) 4(-0.1,6.6) 5(-1.2,6.6) 6(-2.3,6.6) 7(-3.4,6.6) 8(-4.5,6.6) B(-5.45,6.6)
  rrect30% 1x1.2 smd paste+0 mask+0.05: A(-6.3,2.3) M4(4.75,6.6)
  rrect30% 1x0.8 smd paste+0 mask+0.05: M1(-6.3,-3.9)
  rrect30% 1x2.8 smd paste+0 mask+0.05: M2(-6.3,-8.05)
  rrect30% 1.3x1.9 smd paste+0 mask+0.05: M3(6.9,-8.5)
Top Overlay:
  region: -4.5,7.5 -4.1,8 -4.9,8
  region: 1.052,-0.887 0.252,-1.687 0.552,-1.687 0.552,-1.987 1.552,-1.987 1.552,-1.687 1.852,-1.687
  lines w0.2: -6.7,-6.3 -6.7,-4.6 ; -6.7,-3.2 -6.7,1.4 ; -6.7,3.3 -6.7,6.9 -6.2,6.9 ; 5.6,6.9 7.6,6.9 7.6,-7.1 ; -2.312,-7.119 ccw(c-1.931,-7.119) -2.311,-7.146 ; -2.312,-7.119 cw(c0.45,-14.937) 3.212,-7.119 ; -2.312,-7.119 -2.312,-7.092 ; -2.312,-7.092 cw(c0.45,-14.937) 3.212,-7.092 ; -2.312,-7.092 -2.312,-0.368 cw(c-1.931,-0.368) -1.931,0.013 2.184,0.013 cw(c2.184,-0.368) 2.565,-0.368 2.565,-2.395 3.182,-3.121 cw(c3.085,-3.203) 3.212,-3.203 3.212,-3.792 2.958,-3.792 ccw(c2.958,-3.919) 2.831,-3.919 2.831,-4.363 3.212,-4.808 3.212,-7.092 ; -2.311,-7.146 cw(c0.45,-14.937) 3.211,-7.146 ; -2.311,-7.146 ccw(c-1.931,-7.119) -1.931,-7.5 2.831,-7.5 ccw(c2.831,-7.119) 3.211,-7.146 ; 3.211,-7.146 ccw(c2.831,-7.119) 3.212,-7.119 ; 3.212,-7.119 3.212,-7.092
  text "Micro" at -0.448,-6.086 h1.2
  text "SD" at 1.652,-4.786 h1.2
Top Courtyard:
  lines w0.025: -7.05,-9.6 7.8,-9.6 7.8,7.45 -7.05,7.45 -7.05,-9.6
Top Assembly:
  drawing of 442 lines, arcs and shapes, not listed
  text ".Designator" at -6.763,1.821 h3
3D body "DM3AT-SF-PEJM5_v2.STEP": height 1.68, standoff 0, extent -6.5,-9.451 7.35,6.7

## DOSIN-801-0080 [mm] "BNC Connector"
height 15
pads (5):
  rrect50% 2x2 hole 1.2: 1(0,0)
  round 3 hole 1.5: 2(-4,-4) 2(-4,4) 2(4,-4) 2(4,4)
Top Overlay:
  lines w0.2: -5.65,-6.28 -5.65,-7.55 -4.38,-7.55 ; -5.65,6.28 -5.65,7.55 -4.38,7.55 ; 5.28,-7.55 6.55,-7.55 6.55,-6.28 ; 5.28,7.55 6.55,7.55 6.55,6.28
Top Courtyard:
  lines w0.025: -6,-7.65 -6,7.65 6.65,7.65 6.65,6.6 14.8,6.6 14.8,5.1 24.8,5.1 24.8,-5.1 14.8,-5.1 14.8,-6.6 6.65,-6.6 6.65,-7.65 -6,-7.65
Top Assembly:
  lines w0.05: 5,-5 -5,-5 -5,5 5,5 ; 6,-6 6.906,-6 ; 6,6 6.281,6 ; 8.234,5.323 7.927,5.324 ; 9.483,5.325 9.176,5.326 ; 10.732,5.327 10.425,5.328 ; 11.98,5.33 11.674,5.33 ; 13.229,5.332 12.923,5.332 ; 14.178,5.323 14.484,5.323 ; 14.4,-5.99 13.775,6.01 ; 14.478,5.334 14.172,5.334 ; 14.5,-4.8 24.5,-4.8 24.5,4.8 14.5,4.8 ; 14.5,-0.434 14.5,5.306 ; 6.281,6 6.678,5.323 ; 6.281,6 6.906,-6 ; 6.678,5.323 6.976,5.323 ; 6.678,5.323 7.295,-5.327 ; 6.906,-6 7.295,-5.327 ; 6.976,5.323 7.375,6 ; 6.976,5.323 7.605,-5.325 ; 7.295,-5.327 7.605,-5.325 ; 7.375,6 7.531,6 ; 7.375,6 8,-6 ; 7.531,6 7.927,5.324 ; 7.531,6 8.156,-6 ; 7.605,-5.325 8,-6 ; 7.927,5.324 8.544,-5.329 ; 8,-6 8.156,-6 ; 8.156,-6 8.544,-5.329 ; 8.544,-5.329 8.853,-5.323 ; 8.624,6.002 8.78,6.002 ; 8.624,6.002 8.225,5.325 8.853,-5.323 ; 8.624,6.002 9.249,-5.998 ; 8.78,6.002 9.176,5.326 ; 8.78,6.002 9.405,-5.998 ; 8.853,-5.323 9.249,-5.998 ; 9.176,5.326 9.793,-5.327 ; 9.249,-5.998 9.405,-5.998 ; 9.405,-5.998 9.793,-5.327 ; 9.793,-5.327 10.102,-5.321 ; 9.872,6.004 10.029,6.004 ; 9.872,6.004 9.473,5.327 10.102,-5.321 ; 9.872,6.004 10.498,-5.996 ; 10.029,6.004 10.425,5.328 ; 10.029,6.004 10.654,-5.996 ; 10.102,-5.321 10.498,-5.996 ; 10.425,5.328 11.042,-5.325 ; 10.498,-5.996 10.654,-5.996 ; 10.654,-5.996 11.042,-5.325 ; 11.042,-5.325 11.351,-5.319 ; 11.121,6.006 11.278,6.006 ; 11.121,6.006 10.722,5.33 11.351,-5.319 ; 11.121,6.006 11.746,-5.994 ; 11.278,6.006 11.674,5.33 ; 11.278,6.006 11.903,-5.994 ; 11.351,-5.319 11.746,-5.994 ; 11.674,5.33 12.291,-5.323 ; 11.746,-5.994 11.903,-5.994 ; 11.903,-5.994 12.291,-5.323 ; 12.291,-5.323 12.6,-5.317 ; 12.37,6.008 12.526,6.008 ; 12.37,6.008 11.971,5.332 12.6,-5.317 ; 12.37,6.008 12.995,-5.992 ; 12.526,6.008 12.923,5.332 ; 12.526,6.008 13.152,-5.992 ; 12.6,-5.317 12.995,-5.992 ; 12.923,5.332 13.539,-5.321 ; 12.995,-5.992 13.152,-5.992 ; 13.152,-5.992 13.539,-5.321 ; 13.539,-5.321 13.849,-5.315 ; 13.619,6.01 13.775,6.01 ; 13.619,6.01 13.22,5.334 13.849,-5.315 ; 13.619,6.01 14.244,-5.99 ; 13.775,6.01 14.172,5.334 ; 13.849,-5.315 14.244,-5.99 ; 14.172,5.334 14.497,-0.357 14.497,-5.99 14.5,-5.99 14.244,-5.99 ; 5,-7 6,-7 6,7 5,7 5,-7
  text ".Designator" at 12.237,-0.679 h3
3D body "DOSIN-801-0080.x_t": height 16.8, standoff -4, extent -5,-7 24.5,7